# Altium footprint library TitansLib.PcbLib: 333 footprints (part 2 of 21)
Each footprint in its own frame and in the unit in brackets; x right, y up, seen from the top. Pads: shape width x height; smd on the part's side, far side on the other; paste and mask are expansions set on the pad; w line width, h text height; cw(c..) or ccw(c..) is an arc to the next point about the centre after c.
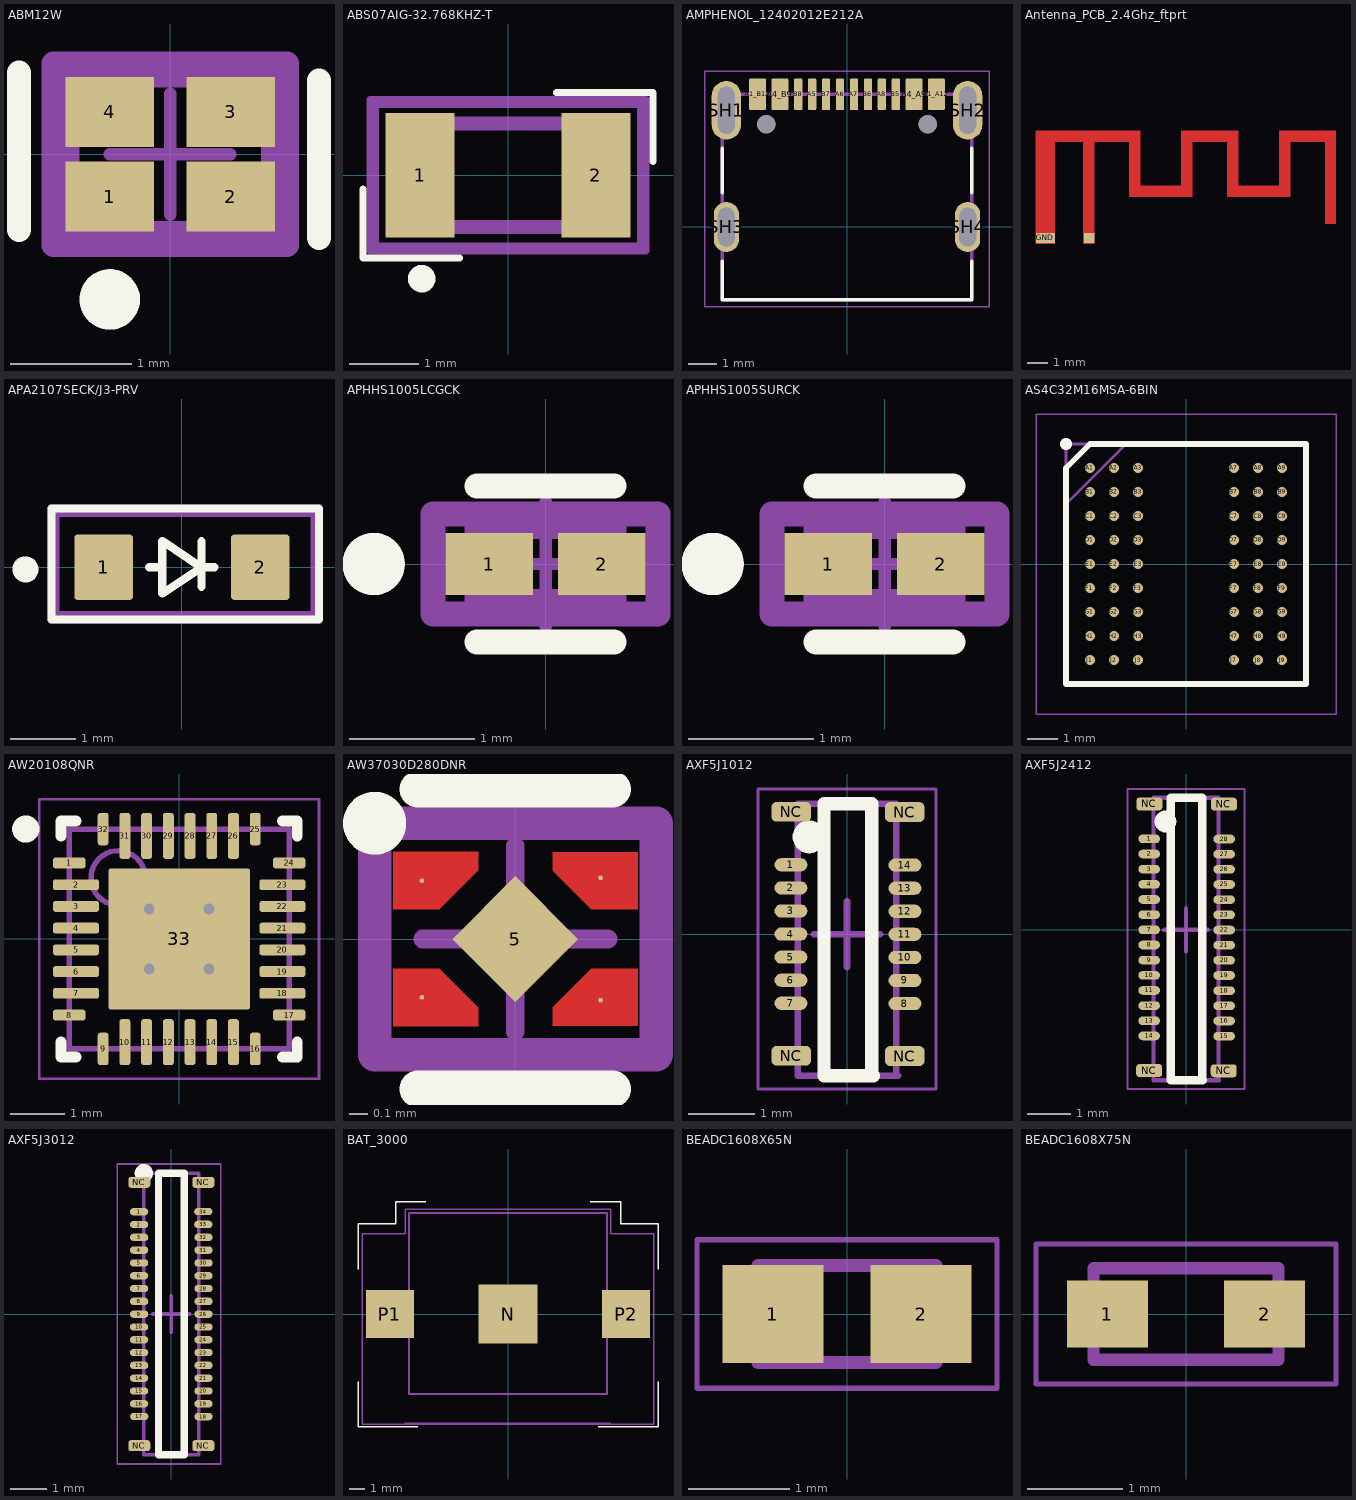
[diagram p1: the footprints below, top view; thin cyan lines are the x and y axes]

## ABM12W [mm]
pads (4):
  rect 0.73x0.58 smd paste+0 mask+0: 1(-0.5,-0.35) 2(0.5,-0.35) 3(0.5,0.35) 4(-0.5,0.35)
Top Overlay:
  circle w0.25: c-0.5,-1.2 r0.125
  lines w0.2: -1.25,-0.625 -1.25,0.675 ; 1.23,-0.69 1.23,0.61
Top 3D Body:
  lines w0.2: -0.85,-0.65 0.85,-0.65 0.85,0.65 -0.85,0.65 -0.85,-0.65
Top Courtyard:
  lines w0.2: -0.965,-0.75 0.965,-0.75 0.965,0.75 -0.965,0.75 -0.965,-0.75
Top Component Center:
  lines w0.1: -0.5,0 0.5,0 ; 0,-0.5 0,0.5
Top Assembly:
  lines w0.2: -0.965,-0.75 0.965,-0.75 0.965,0.75 -0.965,0.75 -0.965,-0.75
3D body "Crys_Abracon_ABM12W-28_2240MHZ-4-D1X-T3_eec.STEP": height 0.25, standoff 0, extent -0.965,-0.75 0.965,0.75

## ABS07AIG-32.768KHZ-T [mm]
pads (2):
  rect 1x1.8 smd: 1(-1.275,0) 2(1.275,0)
Top Overlay:
  circle w0.2: c-1.25,-1.5 r0.1
  lines w0.1: -2.1,-0.2 -2.1,-1.2 -0.7,-1.2 ; 0.7,1.2 2.1,1.2 2.1,0.2
Top Courtyard:
  lines w0.1: -2,-1.1 2,-1.1 2,1.1 -2,1.1 -2,-1 -2,-1.1
Top Assembly:
  lines w0.1: -1.923,-1.023 1.923,-1.023 1.923,1.023 -1.923,1.023 -1.923,-1.023
  text ".Designator" at -1.35,-0.187 h1
Mechanical 13:
  lines w0.2: -1.6,-0.75 1.6,-0.75 1.6,0.75 -1.6,0.75 -1.6,-0.75
3D body "ABS07AIG-32.768KHZ-T.stp": height 0.9, standoff 0, extent -1.58,-0.75 1.62,0.75

## AMPHENOL_12402012E212A [mm]
height 3.26
pads (18):
  rrect16% 0.6x1.14 smd mask+0.05: A1_B12(-3.2,4.75) A4_B9(-2.4,4.75) B1_A12(3.2,4.75) B4_A9(2.4,4.75)
  rrect33% 0.3x1.14 smd mask+0.05: A5(-1.25,4.75) A6(-0.25,4.75) A7(0.25,4.75) A8(1.25,4.75) B5(1.75,4.75) B6(0.75,4.75) B7(-0.75,4.75) B8(-1.75,4.75)
  oval 1.05x2.1 hole 0.6 slot 1.7 at 90 deg: SH1(-4.32,4.18) SH2(4.32,4.18)
  oval 0.9x1.8 hole 0.6 slot 1.4 at 90 deg: SH3(-4.32,0) SH4(4.32,0)
  round 0.65 hole 0.65 unplated mask+0: ""(-2.89,3.68) ""(2.89,3.68)
Top Overlay:
  lines w0.127: -4.47,-1.22 -4.47,-2.6 4.47,-2.6 4.47,-1.22 ; -4.47,1.22 -4.47,2.81 ; 4.47,1.22 4.47,2.81
Mechanical 13:
  lines w0.127: -4.47,-2.6 -4.47,4.75 4.47,4.75 4.47,-2.6 -4.47,-2.6
Mechanical 15:
  lines w0.05: -5.095,-2.85 5.095,-2.85 5.095,5.57 -5.095,5.57 -5.095,-2.85
3D body "step_temp.STEP": height 3.27, standoff -0.89, extent -4.47,-2.59 4.47,5.01

## Antenna_PCB_2.4Ghz_ftprt [mm]
pads (2):
  rect 0.5x0.5 smd mask+0: Feed(-1126.15,-1167.45)
  rect 0.9x0.5 smd mask+0: GND(-1128.25,-1167.45)
Top Layer:
  region: -1128.7,-1167.7 -1127.8,-1167.7 -1127.8,-1162.8 -1126.4,-1162.8 -1126.4,-1167.7 -1125.9,-1167.7 -1125.9,-1162.8 -1124.2,-1162.8 -1124.2,-1165.44 -1121.2,-1165.44 -1121.2,-1162.8 -1119.5,-1162.8 -1119.5,-1165.44 -1116.5,-1165.44 -1116.5,-1162.8 -1114.8,-1162.8 -1114.8,-1166.74 -1114.3,-1166.74 -1114.3,-1162.3 -1117,-1162.3 -1117,-1164.94 -1119,-1164.94 -1119,-1162.3 -1121.7,-1162.3 -1121.7,-1164.94 -1123.7,-1164.94 -1123.7,-1162.3 -1128.7,-1162.3
  lines w0.013: -1128.7,-1167.7 -1128.7,-1162.8 -1128.7,-1162.3 -1123.7,-1162.3 -1123.7,-1162.8 -1123.7,-1164.94 -1121.7,-1164.94 -1121.7,-1162.8 -1121.7,-1162.3 -1119,-1162.3 -1119,-1162.8 -1119,-1164.94 -1117,-1164.94 -1117,-1162.8 -1117,-1162.3 -1114.3,-1162.3 -1114.3,-1162.8 -1114.3,-1166.74 -1114.8,-1166.74 -1114.8,-1162.8 -1116.5,-1162.8 -1116.5,-1165.44 -1117,-1165.44 -1119,-1165.44 -1119.5,-1165.44 -1119.5,-1162.8 -1121.2,-1162.8 -1121.2,-1165.44 -1121.7,-1165.44 -1123.7,-1165.44 -1124.2,-1165.44 -1124.2,-1162.8 -1125.9,-1162.8 -1125.9,-1167.7 -1126.4,-1167.7 -1126.4,-1162.8 -1127.8,-1162.8 -1127.8,-1167.7 -1128.7,-1167.7

## APA2107SECK/J3-PRV [mm] "Red 625nm LED Indication - Discrete 2.2V 2-SMD, No Lead"
pads (2):
  rrect11% 0.9x1 smd mask+0.075: 1(-1.2,0) 2(1.2,0)
Top Overlay:
  circle w0.2: c-2.397,-0.032 r0.1
  lines w0.127: -0.5,0 -0.3,0 ; 0.3,-0.3 0.3,0.4 ; 0.5,0 0.3,0 ; -0.3,0 -0.3,0.4 0.3,0 ; -0.3,0 -0.3,-0.4 0.3,0 ; -2,-0.8 2.1,-0.8 2.1,0.9 -2,0.9 -2,-0.8
Top Courtyard:
  lines w0.127: -2,-0.8 -2,0.9 2.1,0.9 2.1,-0.8 -2,-0.8
Top Assembly:
  lines w0.1: -1.923,-0.723 2.023,-0.723 2.023,0.823 -1.923,0.823 -1.923,-0.723
  text "'.Designator'" at -1.2,-0.312 h1
Mechanical 13:
  lines w0.127: -2,-0.8 -2,0.9 2.1,0.9 2.1,-0.8 -2,-0.8
3D body "APA2107.sldprt": height 0.61, standoff 0.01, extent -1.075,-0.501 1.025,0.5

## APHHS1005LCGCK [mm]
pads (2):
  rect 0.7x0.5 smd paste+0 mask+0: 1(-0.45,0) 2(0.45,0)
Top Overlay:
  circle w0.25: c-1.375,0 r0.125
  lines w0.2: -0.55,-0.625 0.55,-0.625 ; -0.55,0.625 0.55,0.625
Top 3D Body:
  lines w0.2: -0.55,-0.3 0.55,-0.3 0.55,0.3 -0.55,0.3 -0.55,-0.3
Top Courtyard:
  lines w0.2: -0.9,-0.4 0.9,-0.4 0.9,0.4 -0.9,0.4 -0.9,-0.4
Top Component Center:
  lines w0.1: -0.5,0 0.5,0 ; 0,-0.5 0,0.5
Top Assembly:
  lines w0.2: -0.9,-0.4 0.9,-0.4 0.9,0.4 -0.9,0.4 -0.9,-0.4
3D body "APHHS1005 (1).sldprt": height 0.51, standoff 0.01, extent -0.5,-0.25 0.5,0.25

## APHHS1005SURCK [mm]
pads (2):
  rect 0.7x0.5 smd paste+0 mask+0: 1(-0.45,0) 2(0.45,0)
Top Overlay:
  circle w0.25: c-1.375,0 r0.125
  lines w0.2: -0.55,-0.625 0.55,-0.625 ; -0.55,0.625 0.55,0.625
Top 3D Body:
  lines w0.2: -0.55,-0.3 -0.55,0.3 0.55,0.3 0.55,-0.3 -0.55,-0.3
Top Courtyard:
  lines w0.2: -0.9,-0.4 -0.9,0.4 0.9,0.4 0.9,-0.4 -0.9,-0.4
Top Component Center:
  lines w0.1: -0.5,0 0.5,0 ; 0,-0.5 0,0.5
Top Assembly:
  lines w0.2: -0.9,-0.4 -0.9,0.4 0.9,0.4 0.9,-0.4 -0.9,-0.4
3D body "Diode_Kingbright_APHHS1005SURCK_eec.STEP": height 0.25, standoff 0, extent -0.9,-0.4 0.9,0.4

## AS4C32M16MSA-6BIN [mm] "BGA54C80P9X9_800X800X100"
pads (54):
  round 0.33 smd: A1(-3.2,3.2) A2(-2.4,3.2) A3(-1.6,3.2) A7(1.6,3.2) A8(2.4,3.2) A9(3.2,3.2) B1(-3.2,2.4) B2(-2.4,2.4) B3(-1.6,2.4) B7(1.6,2.4) B8(2.4,2.4) B9(3.2,2.4) C1(-3.2,1.6) C2(-2.4,1.6) C3(-1.6,1.6) C7(1.6,1.6) C8(2.4,1.6) C9(3.2,1.6) D1(-3.2,0.8) D2(-2.4,0.8) D3(-1.6,0.8) D7(1.6,0.8) D8(2.4,0.8) D9(3.2,0.8) E1(-3.2,0) E2(-2.4,0) E3(-1.6,0) E7(1.6,0) E8(2.4,0) E9(3.2,0) F1(-3.2,-0.8) F2(-2.4,-0.8) F3(-1.6,-0.8) F7(1.6,-0.8) F8(2.4,-0.8) F9(3.2,-0.8) G1(-3.2,-1.6) G2(-2.4,-1.6) G3(-1.6,-1.6) G7(1.6,-1.6) G8(2.4,-1.6) G9(3.2,-1.6) H1(-3.2,-2.4) H2(-2.4,-2.4) H3(-1.6,-2.4) H7(1.6,-2.4) H8(2.4,-2.4) H9(3.2,-2.4) J1(-3.2,-3.2) J2(-2.4,-3.2) J3(-1.6,-3.2) J7(1.6,-3.2) J8(2.4,-3.2) J9(3.2,-3.2)
Top Overlay:
  circle w0.2: c-4,4 r0.1
  lines w0.2: -4,-4 4,-4 4,4 -3.2,4 -4,3.2 -4,-4
Bottom Assembly:
  lines w0.05: -5,-5 5,-5 5,5 -5,5 -5,-5
Mechanical 15:
  lines w0.1: -4,2 -2,4 ; -4,-4 4,-4 4,4 -4,4 -4,-4
3D body "AS4C32M16MSA-6BIN.stp": height 1, standoff 0, extent -4,-4 4,4

## AW20108QNR [mm] "QFN, 32-Leads, Body 4.00x4.00mm, Pitch 0.40mm, Thermal Pad 2.60x2.60mm, IPC Medium Density"
height 0.8
pads (33):
  rrect50% 0.6x0.2 smd mask+0.05: 1(-2.025,1.4) 8(-2.025,-1.4) 17(2.025,-1.4) 24(2.025,1.4)
  rrect50% 0.85x0.2 smd mask+0.05: 2(-1.9,1) 3(-1.9,0.6) 4(-1.9,0.2) 5(-1.9,-0.2) 6(-1.9,-0.6) 7(-1.9,-1) 18(1.9,-1) 19(1.9,-0.6) 20(1.9,-0.2) 21(1.9,0.2) 22(1.9,0.6) 23(1.9,1)
  rrect50% 0.2x0.6 smd mask+0.05: 9(-1.4,-2.025) 16(1.4,-2.025) 25(1.4,2.025) 32(-1.4,2.025)
  rrect50% 0.2x0.85 smd mask+0.05: 10(-1,-1.9) 11(-0.6,-1.9) 12(-0.2,-1.9) 13(0.2,-1.9) 14(0.6,-1.9) 15(1,-1.9) 26(1,1.9) 27(0.6,1.9) 28(0.2,1.9) 29(-0.2,1.9) 30(-0.6,1.9) 31(-1,1.9)
  rrect3% 2.6x2.6 smd mask+0.05: 33(0,0)
via -0.55,0.55 diameter 0.5 hole 0.2
via 0.55,0.55 diameter 0.5 hole 0.2
via -0.55,-0.55 diameter 0.5 hole 0.2
via 0.55,-0.55 diameter 0.5 hole 0.2
Top Overlay:
  circle w0.25: c-2.825,2.025 r0.125
  lines w0.2: -2.175,-1.9 -2.175,-2.175 -1.9,-2.175 ; -2.175,1.9 -2.175,2.175 -1.9,2.175 ; 1.9,-2.175 2.175,-2.175 2.175,-1.9 ; 1.9,2.175 2.175,2.175 2.175,1.9
Top Courtyard:
  lines w0.05: -2.575,-2.575 -2.575,2.575 2.575,2.575 2.575,-2.575 -2.575,-2.575
  lines w0.1: -0.5,0 0.5,0 ; 0,-0.5 0,0.5
Top Assembly:
  circle w0.1: c-1.125,1.125 r0.5
  lines w0.1: -2.025,-2.025 -2.025,2.025 2.025,2.025 2.025,-2.025 -2.025,-2.025
3D body "QFN40P400X400X80_HS-33N.step": height 0.8, standoff 0, extent -2.075,-2.075 2.075,2.075

## AW37030D280DNR [mm] "300 mA High Performance Low-Dropout Linear Regulator"
pads (5):
  round 0.025 smd paste-2539.97 mask-1000: 1(-0.505,0.315)
  round 0.025 smd paste-1000 mask-1000: 2(-0.505,-0.315) 3(0.46,-0.33) 4(0.46,0.33)
  rect 0.48x0.48 smd rot 135 paste-1000 mask-1000: 5(0,0)
Top Layer:
  region: -0.66,0.47 -0.2,0.47 -0.2,0.37 -0.41,0.16 -0.66,0.16
  region: 0.661,-0.469 0.201,-0.469 0.201,-0.369 0.411,-0.159 0.661,-0.159
  region: 0.661,0.469 0.201,0.469 0.201,0.369 0.411,0.159 0.661,0.159
  region: -0.66,-0.47 -0.2,-0.47 -0.2,-0.37 -0.41,-0.16 -0.66,-0.16
Top Overlay:
  lines w0.18: -0.681,0.638 ccw(c-0.76,0.625) -0.68,0.625
  lines w0.2: -0.525,-0.81 0.525,-0.81 ; -0.525,0.81 0.525,0.81
Top Paste:
  region: -0.318,0 0,-0.318 0.318,0 0,0.318
  region: 0.65,0.435 0.25,0.435 0.25,0.405 0.43,0.225 0.65,0.225
  region: -0.65,-0.435 -0.25,-0.435 -0.25,-0.405 -0.43,-0.225 -0.65,-0.225
  region: 0.65,-0.435 0.25,-0.435 0.25,-0.405 0.43,-0.225 0.65,-0.225
  region: -0.65,0.42 -0.25,0.42 -0.25,0.39 -0.43,0.21 -0.65,0.21
Top Solder:
  region: -0.339,0 0,-0.339 0.339,0 0,0.339
  region: -0.61,0.435 -0.25,0.435 -0.25,0.405 -0.43,0.225 -0.61,0.225
  region: 0.61,0.435 0.25,0.435 0.25,0.405 0.43,0.225 0.61,0.225
  region: 0.61,-0.435 0.25,-0.435 0.25,-0.405 0.43,-0.225 0.61,-0.225
  region: -0.61,-0.435 -0.25,-0.435 -0.25,-0.405 -0.43,-0.225 -0.61,-0.225
Top Component Center:
  lines w0.1: -0.5,0 0.5,0 ; 0,-0.5 0,0.5
Top Assembly:
  lines w0.18: -0.76,-0.625 0.76,-0.625 0.76,0.625 -0.76,0.625 -0.76,-0.625
3D body "aw370.stp": height 0.3, standoff -0.02, extent -0.5,-0.5 0.5,0.5

## AXF5J1012 [mm] "TSSOP, 30-Leads, Body 7,70x1,45mm, Pitch 0,35mm"
height 0.59
pads (18):
  oval 0.5x0.2 smd: 1(-0.85,1.05) 2(-0.85,0.7) 3(-0.85,0.35) 4(-0.85,0) 5(-0.85,-0.35) 6(-0.85,-0.7) 7(-0.85,-1.05) 8(0.879,-1.054) 9(0.879,-0.704) 10(0.879,-0.354) 11(0.879,-0.004) 12(0.879,0.346) 13(0.879,0.696) 14(0.879,1.046)
  rrect50% 0.6x0.3 smd: NC(-0.846,-1.846) NC(-0.846,1.854) NC(0.875,-1.85) NC(0.875,1.85)
Top Overlay:
  circle w0.25: c-0.575,1.475 r0.125
  lines w0.2: -0.35,-2.15 -0.35,1.975 0.375,1.975 0.375,-2.15 ; -0.325,-2.15 0.4,-2.15
Top Courtyard:
  lines w0.05: -1.35,-2.35 1.35,-2.35 1.35,2.2 -1.35,2.2 -1.35,-2.35
  lines w0.1: -0.5,0 0.5,0 ; 0,-0.5 0,0.5
Top Assembly:
  lines w0.1: -0.75,-2.15 -0.75,1.975 0.75,1.975 0.75,-2.15 ; -0.725,-2.15 0.775,-2.15
3D body "AXF5J1012.stp": height 0.59, standoff 0, extent -0.85,-2.1 0.85,2.1

## AXF5J2412 [mm] "TSSOP, 30-Leads, Body 7,70x1,45mm, Pitch 0,35mm"
height 0.59
pads (32):
  oval 0.5x0.2 smd: 1(-0.85,2.1) 2(-0.85,1.75) 3(-0.85,1.4) 4(-0.85,1.05) 5(-0.85,0.7) 6(-0.85,0.35) 7(-0.85,0) 8(-0.85,-0.35) 9(-0.85,-0.7) 10(-0.85,-1.05) 11(-0.85,-1.4) 12(-0.85,-1.75) 13(-0.85,-2.1) 14(-0.85,-2.45) 15(0.879,-2.454) 16(0.879,-2.104) 17(0.879,-1.754) 18(0.879,-1.404) 19(0.879,-1.054) 20(0.879,-0.704) 21(0.879,-0.354) 22(0.879,-0.004) 23(0.879,0.346) 24(0.879,0.696) 25(0.879,1.046) 26(0.879,1.396) 27(0.879,1.746) 28(0.879,2.096)
  rrect50% 0.6x0.3 smd: NC(-0.85,-3.25) NC(-0.846,2.904) NC(0.871,-3.254) NC(0.875,2.9)
Top Overlay:
  circle w0.25: c-0.475,2.5 r0.125
  lines w0.2: -0.35,-3.475 -0.35,3.05 0.375,3.05 0.375,-3.475 ; -0.337,-3.475 0.387,-3.475
Top Courtyard:
  lines w0.05: -1.35,-3.675 -1.35,3.25 1.35,3.25 1.35,-3.675 -1.35,-3.675
  lines w0.1: -0.5,0 0.5,0 ; 0,-0.5 0,0.5
Top Assembly:
  lines w0.1: -0.75,-3.475 -0.75,3.05 0.75,3.05 0.75,-3.475 ; -0.738,-3.475 0.762,-3.475
3D body "AXF5J2412.stp": height 0.59, standoff 0, extent -0.85,-3.5 0.85,3.15

## AXF5J3012 [mm] "TSSOP, 30-Leads, Body 7,70x1,45mm, Pitch 0,35mm"
height 0.59
pads (38):
  oval 0.5x0.2 smd: 1(-0.879,2.796) 2(-0.879,2.446) 3(-0.879,2.096) 4(-0.879,1.746) 5(-0.879,1.396) 6(-0.879,1.046) 7(-0.879,0.696) 8(-0.879,0.346) 9(-0.879,-0.004) 10(-0.879,-0.354) 11(-0.879,-0.704) 12(-0.879,-1.054) 13(-0.879,-1.404) 14(-0.879,-1.754) 15(-0.879,-2.104) 16(-0.879,-2.454) 17(-0.875,-2.8) 18(0.879,-2.804) 19(0.879,-2.454) 20(0.879,-2.104) 21(0.879,-1.754) 22(0.879,-1.404) 23(0.879,-1.054) 24(0.879,-0.704) 25(0.879,-0.354) 26(0.879,-0.004) 27(0.879,0.346) 28(0.879,0.696) 29(0.879,1.046) 30(0.879,1.396) 31(0.879,1.746) 32(0.879,2.096) 33(0.875,2.45) 34(0.875,2.8)
  rrect50% 0.6x0.3 smd: NC(-0.875,-3.6) NC(-0.875,3.6) NC(0.875,-3.6) NC(0.875,3.6)
Top Overlay:
  circle w0.25: c-0.75,3.85 r0.125
  lines w0.2: -0.35,-3.85 0.35,-3.85 0.35,3.85 -0.35,3.85 -0.35,-3.85
Top Courtyard:
  lines w0.05: -1.475,-4.1 1.35,-4.1 1.35,4.1 -1.475,4.1 -1.475,-4.1
  lines w0.1: -0.5,0 0.5,0 ; 0,-0.5 0,0.5
Top Assembly:
  lines w0.1: -0.75,-3.85 0.75,-3.85 0.75,3.85 -0.75,3.85 -0.75,-3.85
3D body "AXF5J3012.stp": height 0.59, standoff 0, extent -0.85,-3.85 0.85,3.85

## BAT_3000 [mm]
height 3.43
pads (3):
  rect 3.96x3.96 smd paste-3: N(0,0)
  rect 3.18x3.18 smd: P1(-7.87,0) P2(7.87,0)
Top Overlay:
  lines w0.1: -10,-4.5 -10,-7.5 -6,-7.5 ; -10,3 -10,6 -7.5,6 -7.5,7.5 -5.5,7.5 ; 5.5,7.5 7.5,7.5 7.5,6 10,6 10,3 ; 6,-7.5 10,-7.5 10,-4.5
Top Assembly:
  lines w0.1: -9.71,-7.34 9.71,-7.34 9.71,5.34 6.855,5.34 6.855,6.975 -6.855,6.975 -6.855,5.34 -9.71,5.34 -9.71,-7.34
  text ".Designator" at -2.16,-0.302 h1
Mechanical 13:
  lines w0.127: -6.605,-5.345 6.605,-5.345 6.605,6.725 -6.605,6.725 -6.605,-5.345
Mechanical 15:
  lines w0.05: -9.71,-7.34 -9.71,5.34 -6.855,5.34 -6.855,6.975 6.855,6.975 6.855,5.34 9.71,5.34 9.71,-7.34 6.855,-7.34 6.855,-7.25 -6.855,-7.25 -6.855,-7.34 -9.71,-7.34
3D body "step_temp.STEP": height 3.25, standoff 0.08, extent -9.474,-6.921 9.474,5.138

## BEADC1608X65N [mm]
pads (2):
  rect 1x0.97 smd: 1(-0.735,0) 2(0.735,0)
Mechanical 13:
  lines w0.127: -0.88,-0.48 -0.88,0.48 0.88,0.48 0.88,-0.48 -0.88,-0.48
Mechanical 15:
  lines w0.05: -1.485,-0.735 -1.485,0.735 1.485,0.735 1.485,-0.735 -1.485,-0.735

## BEADC1608X75N [mm]
pads (2):
  rect 0.85x0.7 smd: 1(-0.825,0) 2(0.825,0)
Mechanical 13:
  lines w0.127: -0.97,-0.48 -0.97,0.48 0.97,0.48 0.97,-0.48 -0.97,-0.48
Mechanical 15:
  lines w0.05: -1.575,-0.735 -1.575,0.735 1.575,0.735 1.575,-0.735 -1.575,-0.735
3D body "BLM18KG101TH1D.STEP": height 0.8, standoff 0, extent -0.8,-0.369 0.8,0.381